# Altium footprint library TSM4NB65CH_C5G.PcbLib: 1 footprints
Each footprint in its own frame and in the unit in brackets; x right, y up, seen from the top. Pads: shape width x height; smd on the part's side, far side on the other; paste and mask are expansions set on the pad; w line width, h text height; cw(c..) or ccw(c..) is an arc to the next point about the centre after c.
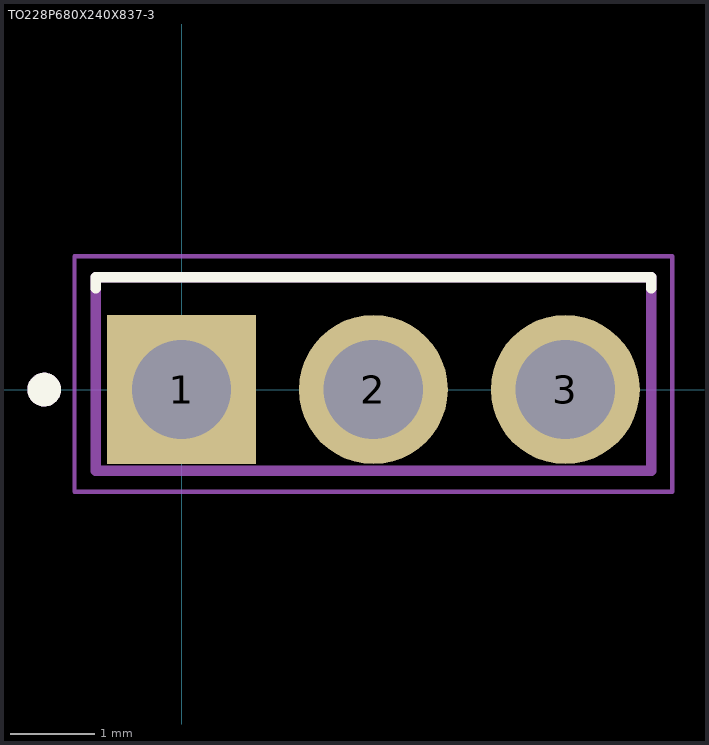
[diagram p0: the footprint, top view; thin cyan lines are the x and y axes]

## TO228P680X240X837-3 [mm]
height 8.37
pads (3):
  rect 1.77x1.77 / inner round 1.77 / far side rect 1.77x1.77 hole 1.18: 1(0,0)
  round 1.77 hole 1.18: 2(2.28,0) 3(4.56,0)
Top Overlay:
  circle w0.2: c-1.631,0 r0.1
  lines w0.127: -1.02,1.205 -1.02,1.335 5.58,1.335 5.58,1.205
Mechanical 13:
  circle w0.2: c-1.631,0 r0.1
  lines w0.127: -1.02,-0.965 -1.02,1.335 5.58,1.335 5.58,-0.965 -1.02,-0.965
Mechanical 15:
  lines w0.05: -1.27,-1.215 5.83,-1.215 5.83,1.585 -1.27,1.585 -1.27,-1.215
3D body "step_temp.STEP": height 7.95, standoff -8.45, extent -1.02,-0.965 5.58,1.335